# Altium footprint library Propia.PcbLib: 378 footprints (part 15 of 24)
Each footprint in its own frame and in the unit in brackets; x right, y up, seen from the top. Pads: shape width x height; smd on the part's side, far side on the other; paste and mask are expansions set on the pad; w line width, h text height; cw(c..) or ccw(c..) is an arc to the next point about the centre after c.
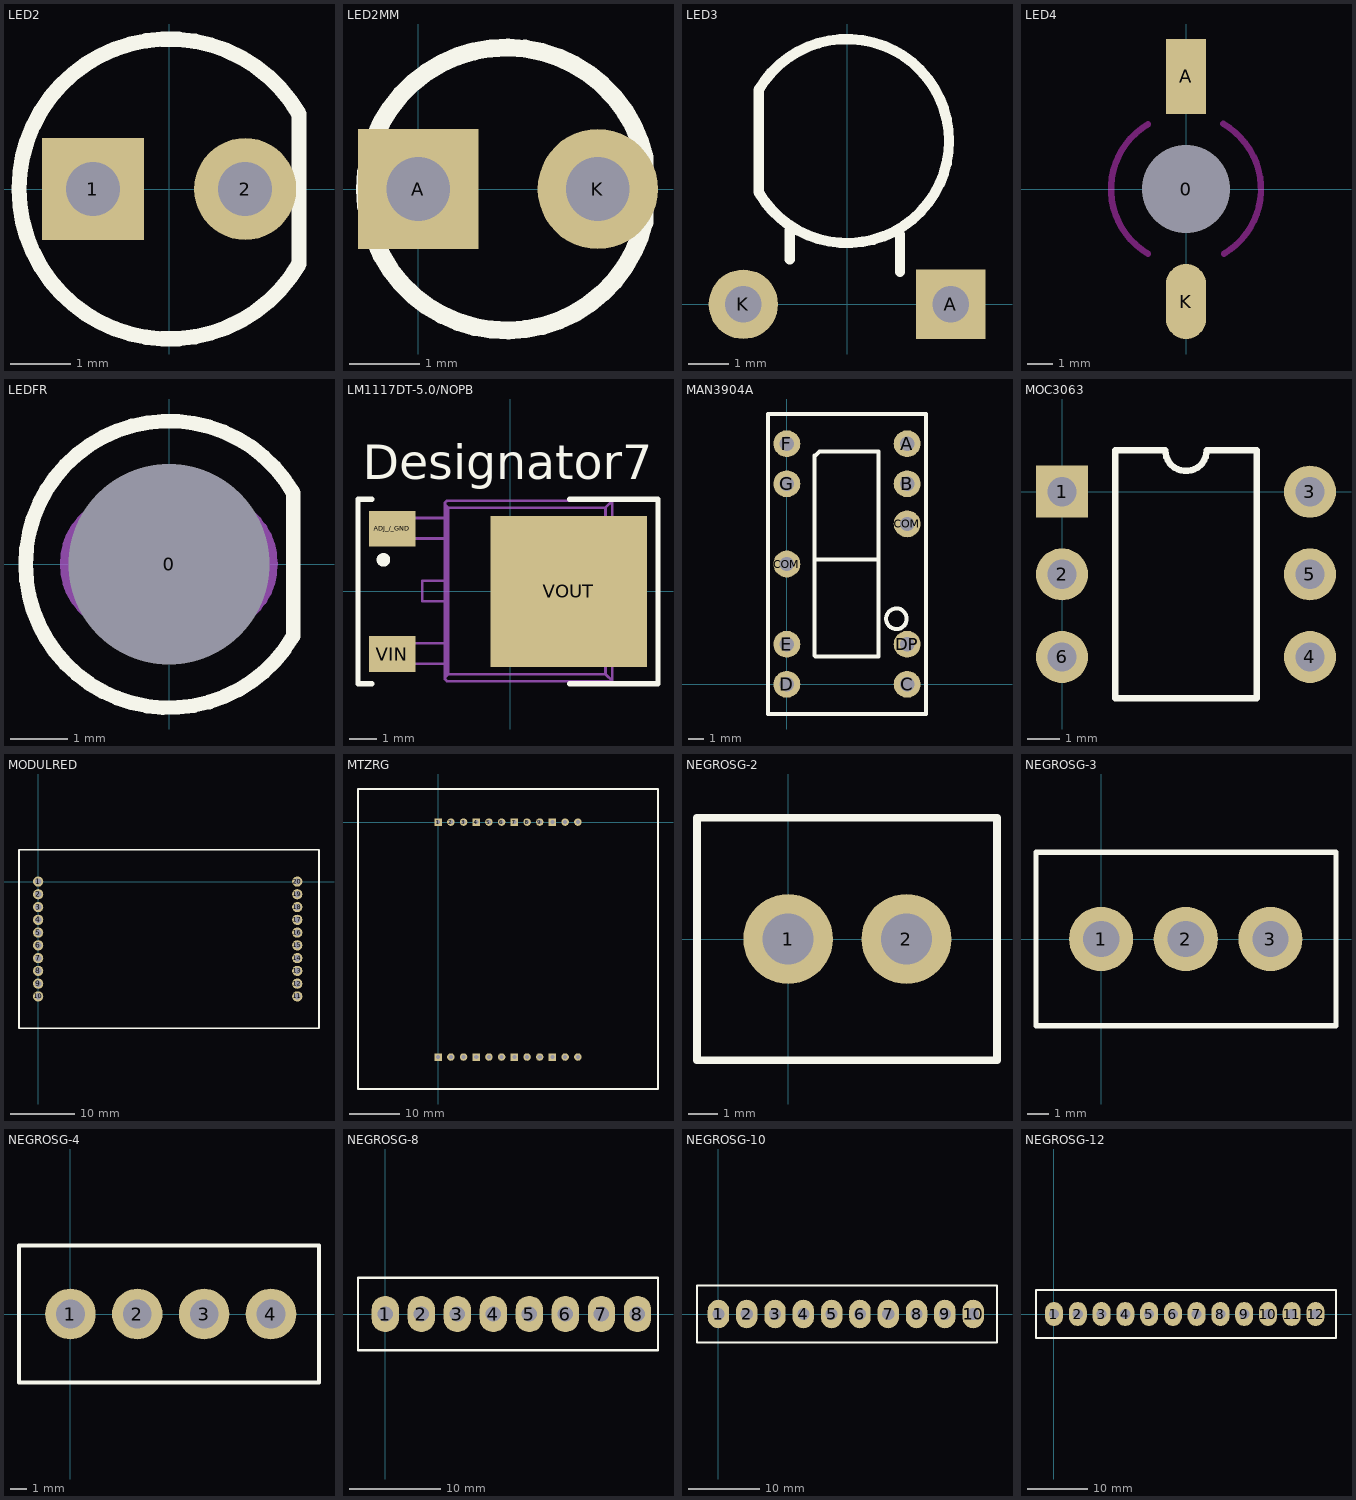
[diagram p14: the footprints below, top view; thin cyan lines are the x and y axes]

## LED2 [mm]
pads (2):
  rect 1.7x1.7 hole 0.9: 1(-1.27,0)
  round 1.7 hole 0.9: 2(1.27,0)
TopOverlay:
  lines w0.254: 2.165,-1.25 cw(c0,0) 2.165,1.25 2.165,-1.25

## LED2MM [mm]
pads (2):
  rect 1.7x1.7 hole 0.9: A(0,0)
  round 1.7 hole 0.9: K(2.54,0)
TopOverlay:
  lines w0.254: 3.2,-0.475 3.2,0.45 ; 3.201,0.439 ccw(c1.25,0) 3.202,-0.434

## LED3 [mm]
pads (2):
  rect 1.7x1.7 hole 0.9: A(2.54,0)
  round 1.7 hole 0.9: K(-2.54,0)
TopOverlay:
  lines w0.254: -1.4,1.1 -1.4,1.8 ; 1.3,0.8 1.3,1.7 ; -2.165,2.75 ccw(c0,4) -2.165,5.25 -2.165,2.75

## LED4 [mm]
pads (3):
  round 3 hole 3.5: 0(0,0)
  rect 1.6x3 smd: A(0,4.5)
  oval 1.6x3 smd: K(0,-4.5)
KeepOutLayer:
  lines w0.254: -1.521,-2.586 cw(c0,0) -1.521,2.586 ; 1.488,2.605 cw(c0,0) 1.521,-2.586

## LEDFR [mil]
pads (1):
  round 60 hole 137.8: 0(0,0)
TopOverlay:
  lines w10: 85.24,-49.21 cw(c0,0) 85.24,49.21 85.24,-49.21
Mechanical1:
  lines w7.87: -70.99,0.24 cw(c-25.69,0.56) -69.08,13.59 cw(c-29.49,1.7) -60.08,29.51 cw(c-1.58,-23.67) -0.09,55.37 cw(c1.32,-23.67) 59.82,29.51 cw(c29.23,1.7) 68.83,13.59 cw(c25.44,0.56) 70.74,0.27 cw(c25.43,-0.05) 68.83,-13.07 cw(c29.23,-1.19) 59.82,-28.99 cw(c1.32,24.18) -0.09,-54.86 cw(c-1.58,24.19) -60.08,-28.99 cw(c-29.49,-1.19) -69.08,-13.07 cw(c-25.69,-0.05) -70.99,0.27

## LM1117DT-5.0/NOPB [mm] "Regulador LM1117DT-5.0/NOPB"
pads (3):
  rect 1.7x1.3 smd paste+0 mask+0.051: ADJ_/_GND(-4.3,2.285) VIN(-4.3,-2.285)
  rect 5.7x5.5 smd paste+0 mask+0.051: VOUT(2.14,0)
TopOverlay:
  circle w0.25: c-4.625,1.15 r0.125
  lines w0.2: -5.05,-3.365 -5.55,-3.365 -5.55,3.365 -5.05,3.365 ; 2.17,-3.365 5.39,-3.365 5.39,3.365 2.17,3.365
  text "Designator7" at -5.385,4.089 h1.27
Mechanical13:
  lines w0.1: -2.376,-0.36 -3.206,-0.36 -3.206,0.39 -2.376,0.39 ; -2.376,1.925 -3.633,1.925 -4.033,1.925 ; -2.376,2.675 -3.633,2.675 -4.033,2.675 ; -4.775,-2.64 -4.233,-2.64 ; -4.775,-2.64 -4.775,-1.89 ; -4.775,-2.64 -4.233,-2.64 ; -4.775,-2.64 -4.775,-1.89 ; -4.775,-2.64 -4.233,-2.64 ; -4.775,-2.64 -4.775,-1.89 ; -4.775,-1.89 -4.233,-1.89 ; -4.775,-1.89 -4.233,-1.89 ; -4.775,-1.89 -4.233,-1.89 ; -4.233,-2.64 -4.033,-2.64 ; -4.233,-2.64 -4.033,-2.64 ; -4.233,-2.64 -4.033,-2.64 ; -4.233,-1.89 -4.033,-1.89 ; -4.233,-1.89 -4.033,-1.89 ; -4.233,-1.89 -4.033,-1.89 ; -4.033,-2.64 -4.033,-1.89 ; -4.033,-2.64 -3.633,-2.64 ; -4.033,-2.64 -4.033,-1.89 ; -4.033,-2.64 -3.633,-2.64 ; -4.033,-2.64 -4.033,-1.89 ; -4.033,-2.64 -3.633,-2.64 ; -4.033,-1.89 -3.633,-1.89 ; -4.033,-1.89 -3.633,-1.89 ; -4.033,-1.89 -3.633,-1.89 ; -4.033,1.925 -4.233,1.925 -4.775,1.925 -4.775,2.675 -4.233,2.675 -4.033,2.675 ; -4.033,1.925 -4.033,2.675 ; -3.633,-2.64 -2.376,-2.64 ; -3.633,-2.64 -2.376,-2.64 ; -3.633,-2.64 -2.376,-2.64 ; -3.633,-1.89 -2.376,-1.89 ; -3.633,-1.89 -2.376,-1.89 ; -3.633,-1.89 -2.376,-1.89 ; -2.376,-3.132 -2.267,-3.023 ; -2.376,-3.132 -2.376,-2.64 ; -2.376,-3.132 -2.376,-3.204 -2.305,-3.275 3.724,-3.275 ; -2.376,-2.64 -2.376,-1.89 ; -2.376,-2.64 -2.376,-1.89 ; -2.376,-2.64 -2.376,-1.89 ; -2.376,-1.89 -2.376,3.162 ; -2.376,3.162 -2.376,3.234 -2.305,3.305 3.724,3.305 ; -2.376,3.162 -2.267,3.053 ; -2.267,-3.023 -2.267,3.053 ; -2.267,-3.023 3.472,-3.023 ; -2.267,3.053 3.472,3.053 ; 3.472,-3.023 3.472,3.053 ; 3.472,-3.023 3.724,-3.275 ; 3.472,3.053 3.724,3.305 ; 3.724,-3.275 3.724,-2.665 4.924,-2.665 4.924,-1.985 4.432,-1.985 4.432,2.015 4.924,2.015 4.924,2.695 3.724,2.695 3.724,3.305 ; 3.724,-1.233 ccw(c3.621,-1.001) 3.875,-1.001 3.875,1.031 ccw(c3.621,1.031) 3.724,1.263 3.724,-1.233

## MAN3904A [mm]
pads (10):
  round 1.7 hole 0.9: A(7.62,15.24) B(7.62,12.7) C(7.62,0) COM(0,7.62) COM(7.62,10.16) D(0,0) DP(7.62,2.54) E(0,2.54) F(0,15.24) G(0,12.7)
TopOverlay:
  circle w0.254: c6.94,4.15 r0.652
  lines w0.254: 1.75,14.48 1.75,1.81 1.81,1.75 5.79,1.75 5.79,14.75 2.08,14.75 1.86,14.53 ; 1.8,7.92 5.63,7.92 ; -1.19,-1.88 -1.19,17.12 8.81,17.12 8.81,-1.88 -1.19,-1.88

## MOC3063 [mm]
pads (6):
  rect 1.6x1.6 hole 0.9: 1(0,0)
  round 1.6 hole 0.9: 2(0,-2.54) 3(7.62,0) 4(7.62,-5.08) 5(7.62,-2.54) 6(0,-5.08)
TopOverlay:
  lines w0.2: 1.635,-6.35 5.985,-6.35 5.985,1.27 4.445,1.27 cw(c3.81,1.27) 3.175,1.27 1.635,1.27 1.635,-6.35

## MODULRED [mm]
pads (20):
  round 1.6 hole 1: 1(0,0) 2(0,-2) 3(0,-4) 4(0,-6) 5(0,-8) 6(0,-10) 7(0,-12) 8(0,-14) 9(0,-16) 10(0,-18) 11(40.6,-18) 12(40.6,-16) 13(40.6,-14) 14(40.6,-12) 15(40.6,-10) 16(40.6,-8) 17(40.6,-6) 18(40.6,-4) 19(40.6,-2) 20(40.6,0)
TopOverlay:
  lines w0.254: -3,-23.01 -3,5 44,5 44,-23 -3,-23

## MTZRG [mm] "Pad para Matriz Bicolor 8x8 con anodo comun"
height 9
pads (24):
  rect 1.5x1.5 hole 0.8: 1(0,0) 4(7.62,0) 7(15.24,0) 10(22.86,0) 15(22.86,-46.99) 18(15.24,-46.99) 21(7.62,-46.99) 24(0,-46.99)
  round 1.5 hole 0.8: 2(2.54,0) 3(5.08,0) 5(10.16,0) 6(12.7,0) 8(17.78,0) 9(20.32,0) 11(25.4,0) 12(27.94,0) 13(27.94,-46.99) 14(25.4,-46.99) 16(20.32,-46.99) 17(17.78,-46.99) 19(12.7,-46.99) 20(10.16,-46.99) 22(5.08,-46.99) 23(2.54,-46.99)
TopOverlay:
  lines w0.5: -16.03,-53.39 -16.03,6.61 43.97,6.61 43.97,-53.39 -16.03,-53.39

## NEGROSG-2 [mm]
pads (2):
  round 3 hole 1.7: 1(0,0) 2(3.962,0)
TopOverlay:
  lines w0.254: -3.048,-4.064 6.992,-4.064 6.992,4.064 -3.048,4.064 -3.048,0 -3.048,-4.064

## NEGROSG-3 [mm]
pads (3):
  round 3 hole 1.7: 1(0,0) 2(3.962,0) 3(7.924,0)
TopOverlay:
  lines w0.254: -3.048,-4.064 10.992,-4.064 10.992,4.064 -3.048,4.064 -3.048,0 -3.048,-4.064

## NEGROSG-4 [mm]
pads (4):
  round 3 hole 1.7: 1(0,0) 2(3.962,0) 3(7.924,0) 4(11.886,0)
TopOverlay:
  lines w0.254: -3.048,-4.064 14.732,-4.064 14.732,4.064 -3.048,4.064 -3.048,0 -3.048,-4.064

## NEGROSG-8 [mm]
pads (8):
  oval 3x4 hole 1.7: 1(0,0) 2(3.962,0) 3(7.925,0) 4(11.887,0) 5(15.85,0) 6(19.812,0) 7(23.774,0) 8(27.737,0)
TopOverlay:
  lines w0.254: -3,-0.01 -3,4 30,4 30,-4 -3,-4 -3,0

## NEGROSG-10 [mm]
pads (10):
  oval 3x4 hole 1.7: 1(0,0) 2(3.962,0) 3(7.925,0) 4(11.887,0) 5(15.85,0) 6(19.812,0) 7(23.774,0) 8(27.737,0) 9(31.699,0) 10(35.662,0)
TopOverlay:
  lines w0.254: -3,-4 -3,4 39,4 39,-4 -3,-4

## NEGROSG-12 [mm]
pads (12):
  oval 3x4 hole 1.7: 1(0,0) 2(3.962,0) 3(7.925,0) 4(11.887,0) 5(15.85,0) 6(19.812,0) 7(23.774,0) 8(27.737,0) 9(31.699,0) 10(35.662,0) 11(39.624,0) 12(43.586,0)
TopOverlay:
  lines w0.254: -3,-4 -3,4 47,4 47,-4 -3,-4